# EAGLE library part MIE1W0505BGLVH-3R-P (library MIE1W0505BGLVH-3R-P)
Isolated DC/DC Converters - SMD Next gen ultra small size isolated power module Source: Datasheet <https://www.mouser.de/datasheet/2/277/MIE1W0505BGLVH-3392698.pdf>
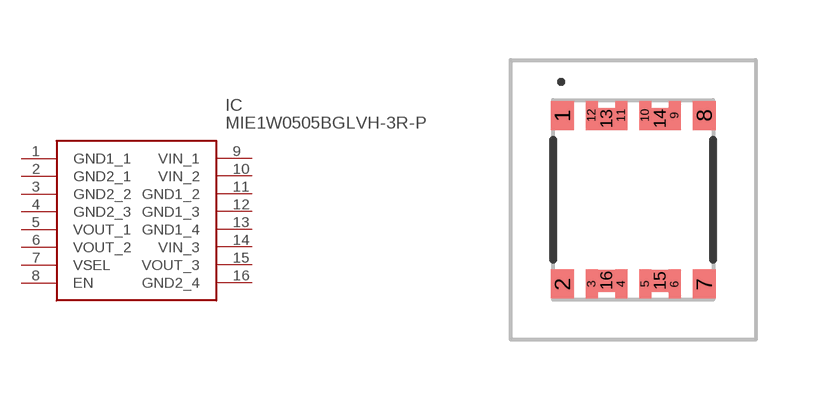
[diagram p0: symbol with the pads of MIE1W0505BGLVH3RP; footprint MIE1W0505BGLVH3RP]

Designator prefix IC

## MIE1W0505BGLVH-3R-P (Description: Isolated DC/DC Converters - SMD Next gen ultra small size isolated power module; Height: 1.28mm; Manufacturer_Name: Monolithic Power Systems (MPS); Manufacturer_Part_Number: MIE1W0505BGLVH-3R-P; Mouser_Part_Number: 946-MIE1W0505BGLVH3P; Mouser_Price-Stock: https://www.mouser.co.uk/ProductDetail/Monolithic-Power-Systems-MPS/MIE1W0505BGLVH-3R-P?qs=mELouGlnn3eSWSUCjBsRGQ%3D%3D)  [MIE1W0505BGLVH3RP]
1  GND1_1
2  GND2_1
3  GND2_2
4  GND2_3
5  VOUT_1
6  VOUT_2
7  VSEL
8  EN
9  VIN_1
10  VIN_2
11  GND1_2
12  GND1_3
13  GND1_4
14  VIN_3
15  VOUT_3
16  GND2_4

## Footprint MIE1W0505BGLVH3RP (pad centres in mm)
MIE1W0505BGLVH-3R-P
smd 0.575 x 0.725: 1 -1.775,2.112; 2 -1.775,-2.112; 7 1.775,-2.112; 8 1.775,2.112
smd 0.3 x 0.725: 3 -1.038,-2.112; 4 -0.3,-2.112; 5 0.3,-2.112; 6 1.038,-2.112; 9 1.038,2.112; 10 0.3,2.112; 11 -0.299,2.112; 12 -1.038,2.112
smd 0.438 x 0.55: 13 -0.668,2.025; 14 0.669,2.025; 15 0.669,-2.025; 16 -0.669,-2.025